# Altium footprint library FootPrintLib_8.PcbLib: 590 footprints (part 21 of 37)
Each footprint in its own frame and in the unit in brackets; x right, y up, seen from the top. Pads: shape width x height; smd on the part's side, far side on the other; paste and mask are expansions set on the pad; w line width, h text height; cw(c..) or ccw(c..) is an arc to the next point about the centre after c.
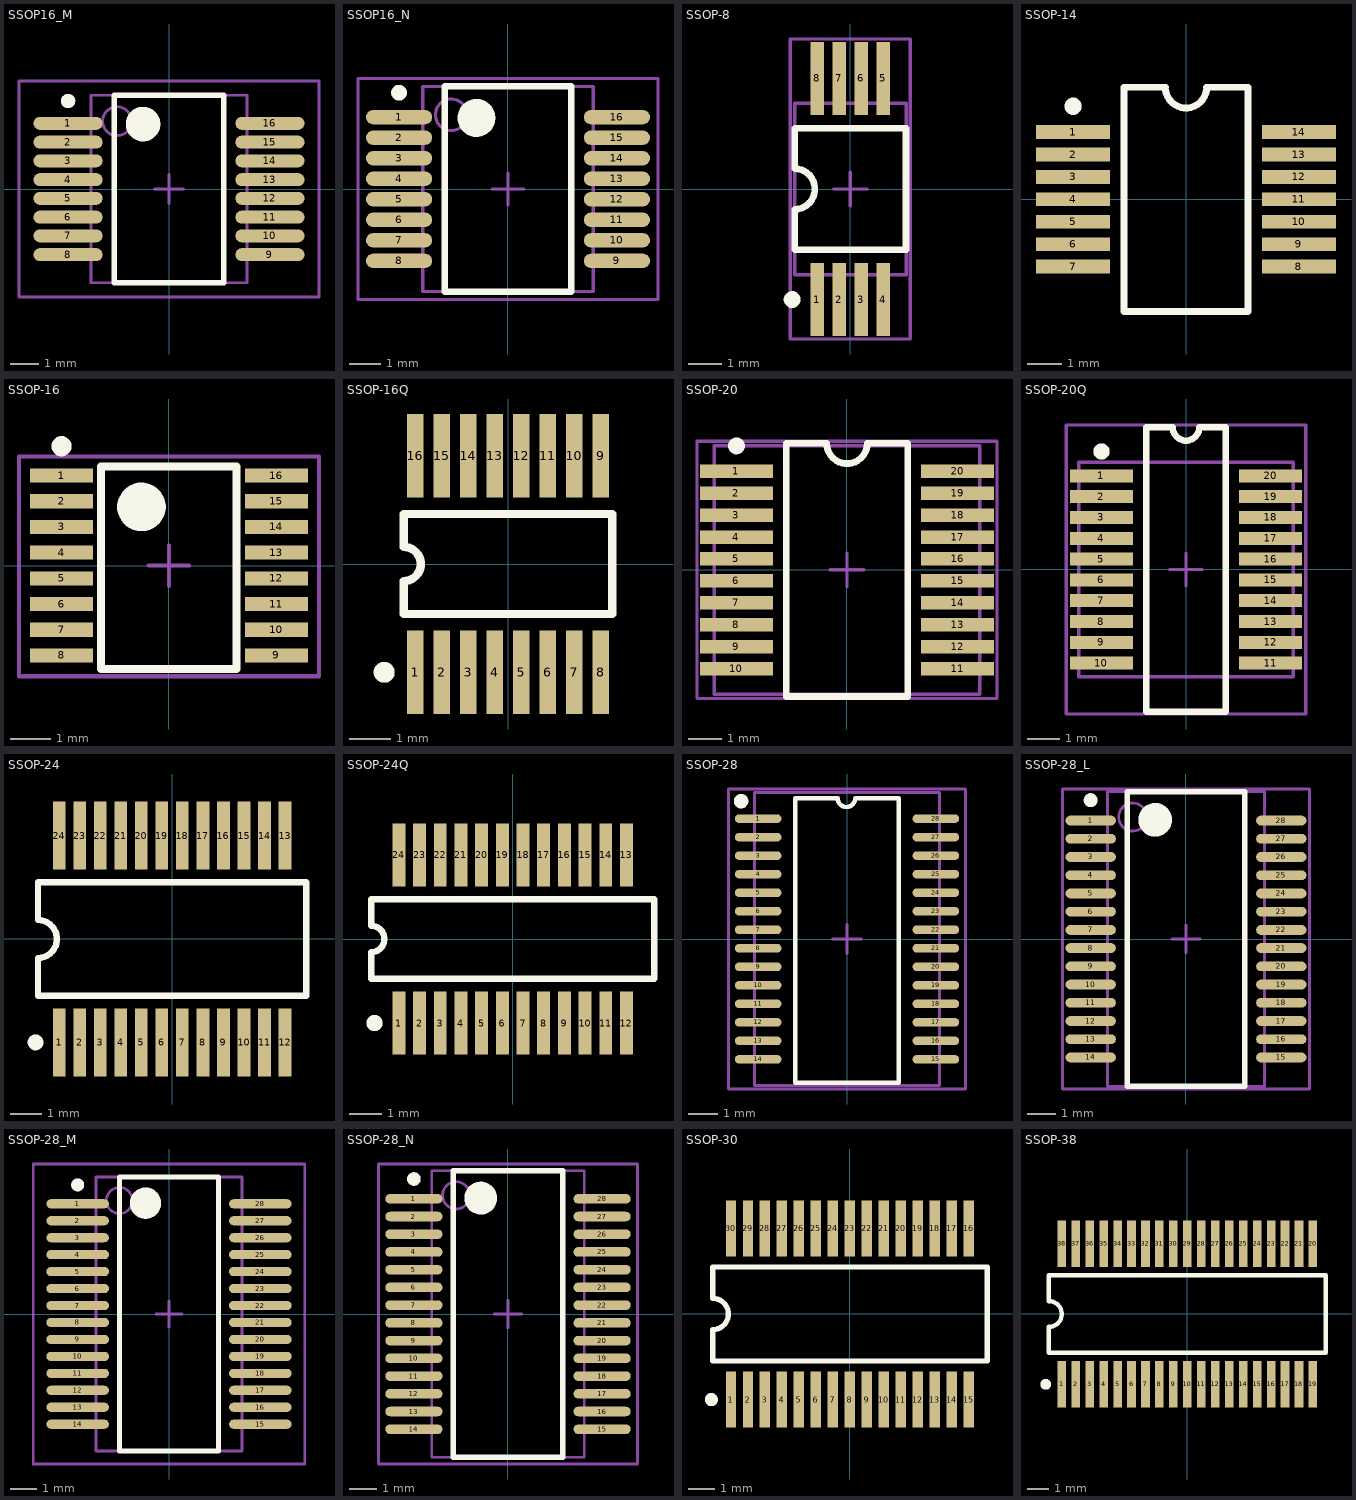
[diagram p20: the footprints below, top view; thin cyan lines are the x and y axes]

## SSOP16_M [mm] "SOP, 16-Leads, Body 6.2x5.3mm, Pitch 0.65mm, IPC Low Density"
height 2
pads (16):
  oval 2.4x0.45 smd: 1(-3.5,2.275) 2(-3.5,1.625) 3(-3.5,0.975) 4(-3.5,0.325) 5(-3.5,-0.325) 6(-3.5,-0.975) 7(-3.5,-1.625) 8(-3.5,-2.275) 9(3.5,-2.275) 10(3.5,-1.625) 11(3.5,-0.975) 12(3.5,-0.325) 13(3.5,0.325) 14(3.5,0.975) 15(3.5,1.625) 16(3.5,2.275)
Top Overlay:
  circle w0.6: c-0.9,2.25 r0.3
  circle w0.25: c-3.5,3.05 r0.125
  lines w0.2: -1.9,-3.25 1.9,-3.25 1.9,3.25 -1.9,3.25 -1.9,-3.25
Mechanical 13:
  circle w0.1: c-1.8,2.35 r0.5
  lines w0.1: -2.7,-3.25 2.7,-3.25 2.7,3.25 -2.7,3.25 -2.7,-3.25
Mechanical 15:
  lines w0.1: -0.5,0 0.5,0 ; 0,-0.5 0,0.5 ; -5.2,-3.75 5.2,-3.75 5.2,3.75 -5.2,3.75 -5.2,-3.75
3D body: height 2, standoff 0, extent -2.7,-3.25 2.7,3.25

## SSOP16_N [mm] "SOP, 16-Leads, Body 6.2x5.3mm, Pitch 0.65mm, IPC Medium Density"
height 2
pads (16):
  oval 2.1x0.45 smd: 1(-3.45,2.275) 2(-3.45,1.625) 3(-3.45,0.975) 4(-3.45,0.325) 5(-3.45,-0.325) 6(-3.45,-0.975) 7(-3.45,-1.625) 8(-3.45,-2.275) 9(3.45,-2.275) 10(3.45,-1.625) 11(3.45,-0.975) 12(3.45,-0.325) 13(3.45,0.325) 14(3.45,0.975) 15(3.45,1.625) 16(3.45,2.275)
Top Overlay:
  circle w0.25: c-3.45,3.05 r0.125
  circle w0.6: c-1,2.25 r0.3
  lines w0.2: -2,-3.25 -2,3.25 2,3.25 2,-3.25 -2,-3.25
Mechanical 13:
  circle w0.1: c-1.8,2.35 r0.5
  lines w0.1: -2.7,-3.25 -2.7,3.25 2.7,3.25 2.7,-3.25 -2.7,-3.25
Mechanical 15:
  lines w0.1: -0.5,0 0.5,0 ; 0,-0.5 0,0.5 ; -4.75,-3.5 -4.75,3.5 4.75,3.5 4.75,-3.5 -4.75,-3.5
3D body: height 2, standoff 0, extent -2.7,-3.25 2.7,3.25

## SSOP-8 [mm] "SSOP, Plastic; 8 Leads; Body Width 5.3 mm; Pitch 0.65 mm"
height 2
pads (8):
  rect 0.4x2.15 smd: 1(-0.975,-3.275) 2(-0.325,-3.275) 3(0.325,-3.275) 4(0.975,-3.275) 5(0.975,3.275) 6(0.325,3.275) 7(-0.325,3.275) 8(-0.975,3.275)
Top Overlay:
  circle w0.25: c-1.725,-3.275 r0.125
  lines w0.2: -1.65,-1.8 -1.65,-0.6 ccw(c-1.65,0) -1.65,0.6 -1.65,1.8 1.65,1.8 1.65,-1.8 -1.65,-1.8
Mechanical 13:
  lines w0.1: -1.651,-2.54 1.651,-2.54 1.651,2.54 -1.651,2.54 -1.651,-2.54
Mechanical 15:
  lines w0.1: -0.5,0 0.5,0 ; 0,-0.5 0,0.5 ; -1.778,-4.445 1.778,-4.445 1.778,4.445 -1.778,4.445 -1.778,-4.445
3D body "User Library-MSOP8-2.step": height 1.01, standoff 0, extent -1.6,-2.565 1.6,2.585

## SSOP-14 [mm] "SSOP, Plastic; 14 Leads; Body Width 5.3 mm; Pitch 0.65 mm"
height 2
pads (14):
  rect 2.15x0.4 smd: 1(-3.279,1.95) 2(-3.279,1.3) 3(-3.279,0.65) 4(-3.279,0) 5(-3.279,-0.65) 6(-3.279,-1.3) 7(-3.279,-1.95) 8(3.271,-1.95) 9(3.271,-1.3) 10(3.271,-0.65) 11(3.271,0) 12(3.271,0.65) 13(3.271,1.3) 14(3.271,1.95)
Top Overlay:
  circle w0.25: c-3.279,2.7 r0.125
  lines w0.2: -1.804,-3.25 -1.804,3.25 -0.604,3.25 ccw(c-0.004,3.25) 0.596,3.25 1.796,3.25 1.796,-3.25 -1.804,-3.25

## SSOP-16 [mm]
height 1.1
pads (16):
  rect 1.55x0.35 smd: 1(-2.654,2.222) 2(-2.654,1.587) 3(-2.654,0.953) 4(-2.654,0.318) 5(-2.654,-0.318) 6(-2.654,-0.953) 7(-2.654,-1.587) 8(-2.654,-2.222) 9(2.655,-2.222) 10(2.655,-1.587) 11(2.654,-0.953) 12(2.655,-0.318) 13(2.655,0.318) 14(2.654,0.953) 15(2.655,1.587) 16(2.655,2.222)
Top Overlay:
  circle w0.25: c-2.654,2.947 r0.125
  circle w0.6: c-0.679,1.448 r0.3
  lines w0.2: -1.68,-2.552 -1.679,2.448 1.671,2.448 1.671,-2.552 -1.68,-2.552
Mechanical 15:
  lines w0.1: -0.5,0 0.5,0 ; 0,-0.5 0,0.5 ; -3.704,-2.736 -3.704,2.698 3.706,2.698 3.706,-2.736 -3.704,-2.736
3D body "TSSOP16.STEP": height 1.09, standoff 0, extent -3.14,-2.5 3.14,2.5

## SSOP-16Q [mm] "SSOP; 16 Leads; Body Width 3.9 mm; Pitch 0.635 mm"
height 1.76
pads (16):
  rect 0.4x2 smd: 1(-2.222,-2.6) 2(-1.587,-2.6) 3(-0.953,-2.6) 4(-0.318,-2.6) 5(0.318,-2.6) 6(0.953,-2.6) 7(1.587,-2.6) 8(2.222,-2.6) 9(2.222,2.6) 10(1.587,2.6) 11(0.953,2.6) 12(0.318,2.6) 13(-0.318,2.6) 14(-0.953,2.6) 15(-1.587,2.6) 16(-2.222,2.6)
Top Overlay:
  circle w0.25: c-2.973,-2.6 r0.125
  lines w0.2: -2.5,-1.2 -2.5,-0.408 ccw(c-2.5,0) -2.5,0.408 -2.5,1.2 2.5,1.2 2.5,-1.2 -2.5,-1.2

## SSOP-20 [mm] "SSOP, Plastic; 20 Leads; Body Width 5.3 mm; Pitch 0.65 mm"
height 2
pads (20):
  rect 2.15x0.4 smd: 1(-3.27,2.918) 2(-3.27,2.268) 3(-3.27,1.618) 4(-3.27,0.968) 5(-3.27,0.319) 6(-3.27,-0.332) 7(-3.27,-0.981) 8(-3.27,-1.632) 9(-3.27,-2.281) 10(-3.27,-2.932) 11(3.28,-2.932) 12(3.28,-2.281) 13(3.28,-1.632) 14(3.28,-0.981) 15(3.28,-0.332) 16(3.28,0.319) 17(3.28,0.968) 18(3.28,1.618) 19(3.28,2.268) 20(3.28,2.918)
Top Overlay:
  circle w0.25: c-3.27,3.668 r0.125
  lines w0.2: -1.795,-3.756 -1.795,3.743 -0.595,3.743 ccw(c0.005,3.743) 0.605,3.743 1.805,3.743 1.805,-3.756 -1.795,-3.756
Mechanical 13:
  lines w0.1: -3.932,-3.69 3.942,-3.69 3.942,3.676 -3.932,3.676 -3.932,-3.69
Mechanical 15:
  lines w0.1: -0.495,-0.007 0.505,-0.007 ; 0.005,-0.507 0.005,0.493 ; -4.44,-3.817 4.45,-3.817 4.45,3.803 -4.44,3.803 -4.44,-3.817
3D body "User Library-SSOP-20.step": height 1.78, standoff -0.21, extent -3.932,-3.69 3.968,3.64

## SSOP-20Q [mm] "SSOP; 20 Leads; Body Width 3.9 mm; Pitch 0.64 mm"
height 1.75
pads (20):
  rect 1.95x0.4 smd: 1(-2.602,2.878) 2(-2.602,2.238) 3(-2.602,1.598) 4(-2.602,0.958) 5(-2.602,0.318) 6(-2.602,-0.322) 7(-2.602,-0.962) 8(-2.602,-1.602) 9(-2.602,-2.242) 10(-2.602,-2.882) 11(2.598,-2.882) 12(2.598,-2.242) 13(2.598,-1.602) 14(2.598,-0.962) 15(2.598,-0.322) 16(2.598,0.318) 17(2.598,0.958) 18(2.598,1.598) 19(2.598,2.238) 20(2.598,2.878)
Top Overlay:
  circle w0.25: c-2.602,3.628 r0.125
  lines w0.2: -1.227,-4.377 1.223,-4.377 1.223,4.373 0.406,4.373 cw(c-0.002,4.373) -0.41,4.373 -1.227,4.373 -1.227,-4.377
Mechanical 13:
  lines w0.1: -3.304,-3.304 3.3,-3.304 3.3,3.3 -3.304,3.3 -3.304,-3.304
Mechanical 15:
  lines w0.1: -0.502,-0.002 0.498,-0.002 ; -0.002,-0.502 -0.002,0.498 ; -3.685,-4.447 3.681,-4.447 3.681,4.443 -3.685,4.443 -3.685,-4.447
3D body "User Library-TSSOP-20-1.step": height 1.2, standoff 0, extent -3.277,-3.3 3.273,3.3

## SSOP-24 [mm] "SSOP, Plastic; 24 Leads; Body Width 5.3 mm; Pitch 0.65 mm"
height 2
pads (24):
  rect 0.4x2.15 smd: 1(-3.575,-3.275) 2(-2.925,-3.275) 3(-2.275,-3.275) 4(-1.625,-3.275) 5(-0.975,-3.275) 6(-0.325,-3.275) 7(0.325,-3.275) 8(0.975,-3.275) 9(1.625,-3.275) 10(2.275,-3.275) 11(2.925,-3.275) 12(3.575,-3.275) 13(3.575,3.275) 14(2.925,3.275) 15(2.275,3.275) 16(1.625,3.275) 17(0.975,3.275) 18(0.325,3.275) 19(-0.325,3.275) 20(-0.975,3.275) 21(-1.625,3.275) 22(-2.275,3.275) 23(-2.925,3.275) 24(-3.575,3.275)
Top Overlay:
  circle w0.25: c-4.325,-3.275 r0.125
  lines w0.2: -4.25,-1.8 4.25,-1.8 4.25,1.8 -4.25,1.8 -4.25,0.6 cw(c-4.25,0) -4.25,-0.6 -4.25,-1.8

## SSOP-24Q [mm] "SSOP; 24 Leads; Body Width 3.9 mm; Pitch 0.64 mm"
height 1.75
pads (24):
  rect 0.4x1.95 smd: 1(-3.52,-2.6) 2(-2.88,-2.6) 3(-2.24,-2.6) 4(-1.6,-2.6) 5(-0.96,-2.6) 6(-0.32,-2.6) 7(0.32,-2.6) 8(0.96,-2.6) 9(1.6,-2.6) 10(2.24,-2.6) 11(2.88,-2.6) 12(3.52,-2.6) 13(3.52,2.6) 14(2.88,2.6) 15(2.24,2.6) 16(1.6,2.6) 17(0.96,2.6) 18(0.32,2.6) 19(-0.32,2.6) 20(-0.96,2.6) 21(-1.6,2.6) 22(-2.24,2.6) 23(-2.88,2.6) 24(-3.52,2.6)
Top Overlay:
  circle w0.25: c-4.27,-2.6 r0.125
  lines w0.2: -4.375,-1.225 4.375,-1.225 4.375,1.225 -4.375,1.225 -4.375,0.408 cw(c-4.375,0) -4.375,-0.408 -4.375,-1.225

## SSOP-28 [mm] "SSOP, Plastic; 28 Leads; Body Width 5.3 mm; Pitch 0.65 mm"
height 2
pads (28):
  oval 1.6x0.3 smd: 1(-3.048,4.127) 2(-3.048,3.492) 3(-3.048,2.857) 4(-3.048,2.222) 5(-3.048,1.587) 6(-3.048,0.953) 7(-3.048,0.318) 8(-3.048,-0.318) 9(-3.048,-0.953) 10(-3.048,-1.587) 11(-3.048,-2.222) 12(-3.048,-2.857) 13(-3.048,-3.492) 14(-3.048,-4.127) 15(3.048,-4.127) 16(3.048,-3.492) 17(3.048,-2.857) 18(3.048,-2.222) 19(3.048,-1.587) 20(3.048,-0.953) 21(3.048,-0.318) 22(3.048,0.318) 23(3.048,0.953) 24(3.048,1.587) 25(3.048,2.222) 26(3.048,2.857) 27(3.048,3.492) 28(3.048,4.127)
Top Overlay:
  circle w0.25: c-3.63,4.726 r0.125
  lines w0.152: -0.348,4.826 -1.778,4.826 -1.778,-4.928 1.778,-4.928 1.778,4.826 0.279,4.826 cw(c-0.021,4.826) -0.321,4.826
Mechanical 13:
  lines w0.1: -3.175,-5.016 -3.175,5.016 3.175,5.016 3.175,-5.016 -3.175,-5.016
Mechanical 15:
  lines w0.1: -0.5,0 0.5,0 ; 0,-0.5 0,0.5 ; -4.064,-5.143 -4.064,5.143 4.064,5.143 4.064,-5.143 -4.064,-5.143
3D body "User Library-SSOP28_LTC1923.STEP": height 1.75, standoff 0, extent -3.099,-4.978 3.089,5.004

## SSOP-28_L [mm] "SOP, 28-Leads, Body 10.2x5.3mm, Pitch 0.65mm, IPC High Density"
height 2
pads (28):
  oval 1.8x0.35 smd: 1(-3.4,4.225) 2(-3.4,3.575) 3(-3.4,2.925) 4(-3.4,2.275) 5(-3.4,1.625) 6(-3.4,0.975) 7(-3.4,0.325) 8(-3.4,-0.325) 9(-3.4,-0.975) 10(-3.4,-1.625) 11(-3.4,-2.275) 12(-3.4,-2.925) 13(-3.4,-3.575) 14(-3.4,-4.225) 15(3.4,-4.225) 16(3.4,-3.575) 17(3.4,-2.925) 18(3.4,-2.275) 19(3.4,-1.625) 20(3.4,-0.975) 21(3.4,-0.325) 22(3.4,0.325) 23(3.4,0.975) 24(3.4,1.625) 25(3.4,2.275) 26(3.4,2.925) 27(3.4,3.575) 28(3.4,4.225)
Top Overlay:
  circle w0.6: c-1.1,4.25 r0.3
  circle w0.25: c-3.4,4.95 r0.125
  lines w0.2: -2.1,-5.25 2.1,-5.25 2.1,5.25 -2.1,5.25 -2.1,-5.25
Mechanical 13:
  circle w0.1: c-1.9,4.35 r0.5
  lines w0.1: -2.8,-5.25 2.8,-5.25 2.8,5.25 -2.8,5.25 -2.8,-5.25
Mechanical 15:
  lines w0.1: -0.5,0 0.5,0 ; 0,-0.5 0,0.5 ; -4.4,-5.35 4.4,-5.35 4.4,5.35 -4.4,5.35 -4.4,-5.35
3D body "User Library-SSOP-28-FT232RL.step": height 2.16, standoff 0, extent -3.878,-5.165 3.878,5.165

## SSOP-28_M [mm] "SOP, 28-Leads, Body 10.2x5.3mm, Pitch 0.65mm, IPC Low Density"
height 2
pads (28):
  oval 2.4x0.35 smd: 1(-3.5,4.225) 2(-3.5,3.575) 3(-3.5,2.925) 4(-3.5,2.275) 5(-3.5,1.625) 6(-3.5,0.975) 7(-3.5,0.325) 8(-3.5,-0.325) 9(-3.5,-0.975) 10(-3.5,-1.625) 11(-3.5,-2.275) 12(-3.5,-2.925) 13(-3.5,-3.575) 14(-3.5,-4.225) 15(3.5,-4.225) 16(3.5,-3.575) 17(3.5,-2.925) 18(3.5,-2.275) 19(3.5,-1.625) 20(3.5,-0.975) 21(3.5,-0.325) 22(3.5,0.325) 23(3.5,0.975) 24(3.5,1.625) 25(3.5,2.275) 26(3.5,2.925) 27(3.5,3.575) 28(3.5,4.225)
Top Overlay:
  circle w0.25: c-3.5,4.95 r0.125
  circle w0.6: c-0.9,4.25 r0.3
  lines w0.2: -1.9,-5.25 -1.9,5.25 1.9,5.25 1.9,-5.25 -1.9,-5.25
Mechanical 13:
  circle w0.1: c-1.9,4.35 r0.5
  lines w0.1: -2.8,-5.25 -2.8,5.25 2.8,5.25 2.8,-5.25 -2.8,-5.25
Mechanical 15:
  lines w0.1: -0.5,0 0.5,0 ; 0,-0.5 0,0.5 ; -5.2,-5.75 -5.2,5.75 5.2,5.75 5.2,-5.75 -5.2,-5.75
3D body "User Library-SSOP-28-FT232RL.step": height 2.16, standoff 0, extent -3.878,-5.165 3.878,5.165

## SSOP-28_N [mm] "SOP, 28-Leads, Body 10.2x5.3mm, Pitch 0.65mm, IPC Medium Density"
height 2
pads (28):
  oval 2.1x0.35 smd: 1(-3.45,4.225) 2(-3.45,3.575) 3(-3.45,2.925) 4(-3.45,2.275) 5(-3.45,1.625) 6(-3.45,0.975) 7(-3.45,0.325) 8(-3.45,-0.325) 9(-3.45,-0.975) 10(-3.45,-1.625) 11(-3.45,-2.275) 12(-3.45,-2.925) 13(-3.45,-3.575) 14(-3.45,-4.225) 15(3.45,-4.225) 16(3.45,-3.575) 17(3.45,-2.925) 18(3.45,-2.275) 19(3.45,-1.625) 20(3.45,-0.975) 21(3.45,-0.325) 22(3.45,0.325) 23(3.45,0.975) 24(3.45,1.625) 25(3.45,2.275) 26(3.45,2.925) 27(3.45,3.575) 28(3.45,4.225)
Top Overlay:
  circle w0.25: c-3.45,4.95 r0.125
  circle w0.6: c-1,4.25 r0.3
  lines w0.2: -2,-5.25 -2,5.25 2,5.25 2,-5.25 -2,-5.25
Mechanical 13:
  circle w0.1: c-1.9,4.35 r0.5
  lines w0.1: -2.8,-5.25 -2.8,5.25 2.8,5.25 2.8,-5.25 -2.8,-5.25
Mechanical 15:
  lines w0.1: -0.5,0 0.5,0 ; 0,-0.5 0,0.5 ; -4.75,-5.5 -4.75,5.5 4.75,5.5 4.75,-5.5 -4.75,-5.5
3D body "User Library-SSOP-28-FT232RL.step": height 2.16, standoff 0, extent -3.878,-5.165 3.878,5.165

## SSOP-30 [mm] "SSOP, Plastic; 30 Leads; Body Width 5.3 mm; Pitch 0.65 mm"
height 2
pads (30):
  rect 0.4x2.15 smd: 1(-4.55,-3.275) 2(-3.9,-3.275) 3(-3.25,-3.275) 4(-2.6,-3.275) 5(-1.95,-3.275) 6(-1.3,-3.275) 7(-0.65,-3.275) 8(0,-3.275) 9(0.65,-3.275) 10(1.3,-3.275) 11(1.95,-3.275) 12(2.6,-3.275) 13(3.25,-3.275) 14(3.9,-3.275) 15(4.55,-3.275) 16(4.55,3.275) 17(3.9,3.275) 18(3.25,3.275) 19(2.6,3.275) 20(1.95,3.275) 21(1.3,3.275) 22(0.65,3.275) 23(0,3.275) 24(-0.65,3.275) 25(-1.3,3.275) 26(-1.95,3.275) 27(-2.6,3.275) 28(-3.25,3.275) 29(-3.9,3.275) 30(-4.55,3.275)
Top Overlay:
  circle w0.25: c-5.3,-3.275 r0.125
  lines w0.2: -5.25,-1.8 5.25,-1.8 5.25,1.8 -5.25,1.8 -5.25,0.6 cw(c-5.25,0) -5.25,-0.6 -5.25,-1.8

## SSOP-38 [mm] "SSOP, Plastic; 38 Leads; Body Width 5.3 mm; Pitch 0.65 mm"
height 2
pads (38):
  rect 0.4x2.15 smd: 1(-5.85,-3.275) 2(-5.2,-3.275) 3(-4.55,-3.275) 4(-3.9,-3.275) 5(-3.25,-3.275) 6(-2.6,-3.275) 7(-1.95,-3.275) 8(-1.3,-3.275) 9(-0.65,-3.275) 10(0,-3.275) 11(0.65,-3.275) 12(1.3,-3.275) 13(1.95,-3.275) 14(2.6,-3.275) 15(3.25,-3.275) 16(3.9,-3.275) 17(4.55,-3.275) 18(5.2,-3.275) 19(5.85,-3.275) 20(5.85,3.275) 21(5.2,3.275) 22(4.55,3.275) 23(3.9,3.275) 24(3.25,3.275) 25(2.6,3.275) 26(1.95,3.275) 27(1.3,3.275) 28(0.65,3.275) 29(0,3.275) 30(-0.65,3.275) 31(-1.3,3.275) 32(-1.95,3.275) 33(-2.6,3.275) 34(-3.25,3.275) 35(-3.9,3.275) 36(-4.55,3.275) 37(-5.2,3.275) 38(-5.85,3.275)
Top Overlay:
  circle w0.25: c-6.6,-3.275 r0.125
  lines w0.2: -6.45,-1.8 6.45,-1.8 6.45,1.8 -6.45,1.8 -6.45,0.6 cw(c-6.45,0) -6.45,-0.6 -6.45,-1.8